# Altium schematic symbol library R_10K7.SchLib: 1 symbol
Pins are listed as number, name and electrical type; pins without a type are passive.

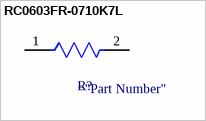
[diagram p0: symbol RC0603FR-0710K7L]

## RC0603FR-0710K7L
designator R?  (value not drawn)
pins: 1, 2